# Altium schematic symbol library OP284ESZ.SchLib: 1 symbol
Pins are listed as number, name and electrical type; pins without a type are passive.

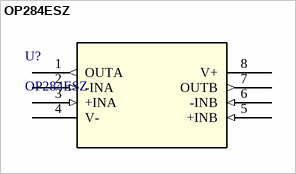
[diagram p0: symbol OP284ESZ]

## OP284ESZ
designator U?
Precision RRIO Dual Op Amp; Manufacturer_Name: Analog Devices Inc; Copyright: Copyright (C) 2026 Ultra Librarian. All rights reserved.; Manufacturer_Part_Number: OP284ESZ; RefDes: RefDes; Type: Type
footprint R-8_ADI
pins: 1 OUTA (out), 2 -INA (in), 3 +INA (in), 4 V- (power), 5 +INB (in), 6 -INB (in), 7 OUTB (out), 8 V+ (power)